# Altium schematic symbol library TCM1-63AX+.SchLib: 1 symbol
Pins are listed as number, name and electrical type; pins without a type are passive.

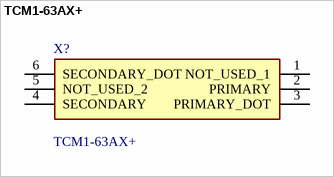
[diagram p0: symbol TCM1-63AX+]

## TCM1-63AX+
designator X?
RF Balun 10MHz ~ 6GHz 50 / 50Ohm 6-SMD Module 10MHz ~ 6GHz 9.42dB 2.5dB; Manufacturer_Name: Mini-Circuits; Geometry.Height: 4.06mm; Mouser Part Number: 139-TCM1-63AX; Mouser Price/Stock: https://www.mouser.co.uk/ProductDetail/Mini-Circuits/TCM1-63AX%2b?qs=xZ%2FP%252Ba9zWqaLvjkaLlAVvw%3D%3D; Manufacturer_Part_Number: TCM1-63AX+; Datasheet Link: https://www.minicircuits.com/pdfs/TCM1-63AX+.pdf?srsltid=AfmBOopccNdTW2iQ-1Z0eqWfv7bI4WP4UY3kaUh0VYjPlJWZI-4Uwe80
footprint TCM163AX
pins: 1 NOT_USED_1, 2 PRIMARY, 3 PRIMARY_DOT, 4 SECONDARY, 5 NOT_USED_2, 6 SECONDARY_DOT